# EAGLE library part 6213XX245821_621308245821 (library WR-PHD)
WR-PHD 2.00 mm SMT Dual Pin Header Low Profile Article Properties Pins 4 unitless; 6 unitless; 8 unitless; 10 unitless; 14 unitless; 16 unitless; 20 unitless; 24 unitless General Information Operating Temperature -40 °C up to +105 °C Compliance Lead free / RoHS Pitch 2 mm Durability 50 Cycles Rows Dual Gender Pin Header Type Straight Low Profile Material Properties Insulator Material PA9T Insulator Flammability Rating UL94 V-0 Contact Material Copper Alloy Contact Plating Gold Contact Type Stamped Certification UL Approval E323964 Packaging Properties Packaging Tape and Reel with Cap; Tube Electrical Properties IR 2 A Withstanding Voltage 500 V (AC) Contact Resistance 20 mΩ RISO 1000 MΩ <https://www.we-online.com/components/media/o57944v209%20Family_SMD_Low%20Profile_621xxx245821.jpg> Details see: www.we-online.com/en/components/products/PHD_2_00_SMT_DUAL_PIN_HEADER_LOW_PROFILE_6210XX245821 <www.we-online.com/en/components/products/PHD_2_00_SMT_DUAL_PIN_HEADER_LOW_PROFILE_6210XX245821/?utm_source=eagle_model&utm_medium=description_link&utm_campaign=eisos_eagle> Updated by Ella 2024-01-31 2024 (C) Würth Elektronik
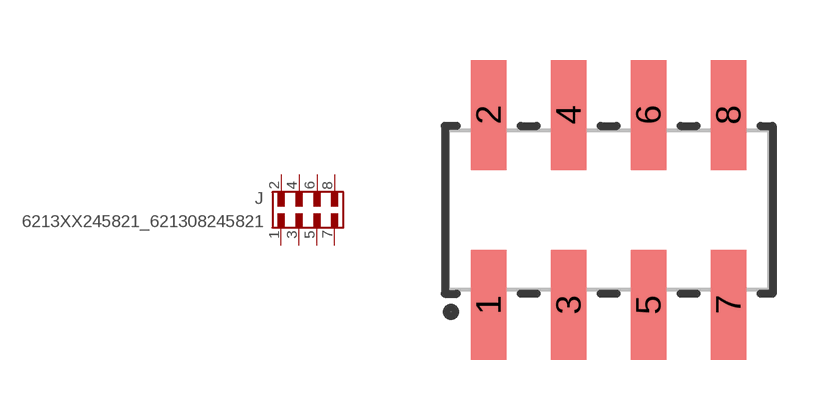
[diagram p330: symbol with the pads of 621308245821; footprint 621308245821]

Designator prefix J

## 6213XX245821_621308245821 (DATASHEET-URL: https://www.we-online.com/redexpert/spec/621308245821?ae; GENDER: Pin Header; IR: 2A; MOUNT: SMT; PACKAGING: Tape and Reel with Cap; PART-NUMBER: 621308245821; PINS: 8; PITCH: 2.00 mm; ROWS: Dual; TYPE: Straight Low Profile; VALUE: 621308245821)  [621308245821]
1  1  pas
2  2  pas
3  3  pas
4  4  pas
5  5  pas
6  6  pas
7  7  pas
8  8  pas

## Footprint 621308245821 (pad centres in mm)
WR-PHD 2.00 mm SMT Dual Pin Header Low Profile (Reel),8Pins
smd 0.89 x 2.75: 1 -3,-2.375; 2 -3,2.375; 3 -1,-2.375; 4 -1,2.375; 5 1,-2.375; 6 1,2.375; 7 3,-2.375; 8 3,2.375